# Altium schematic symbol library Module.SchLib: 89 symbols
Pins are listed as number, name and electrical type; pins without a type are passive.

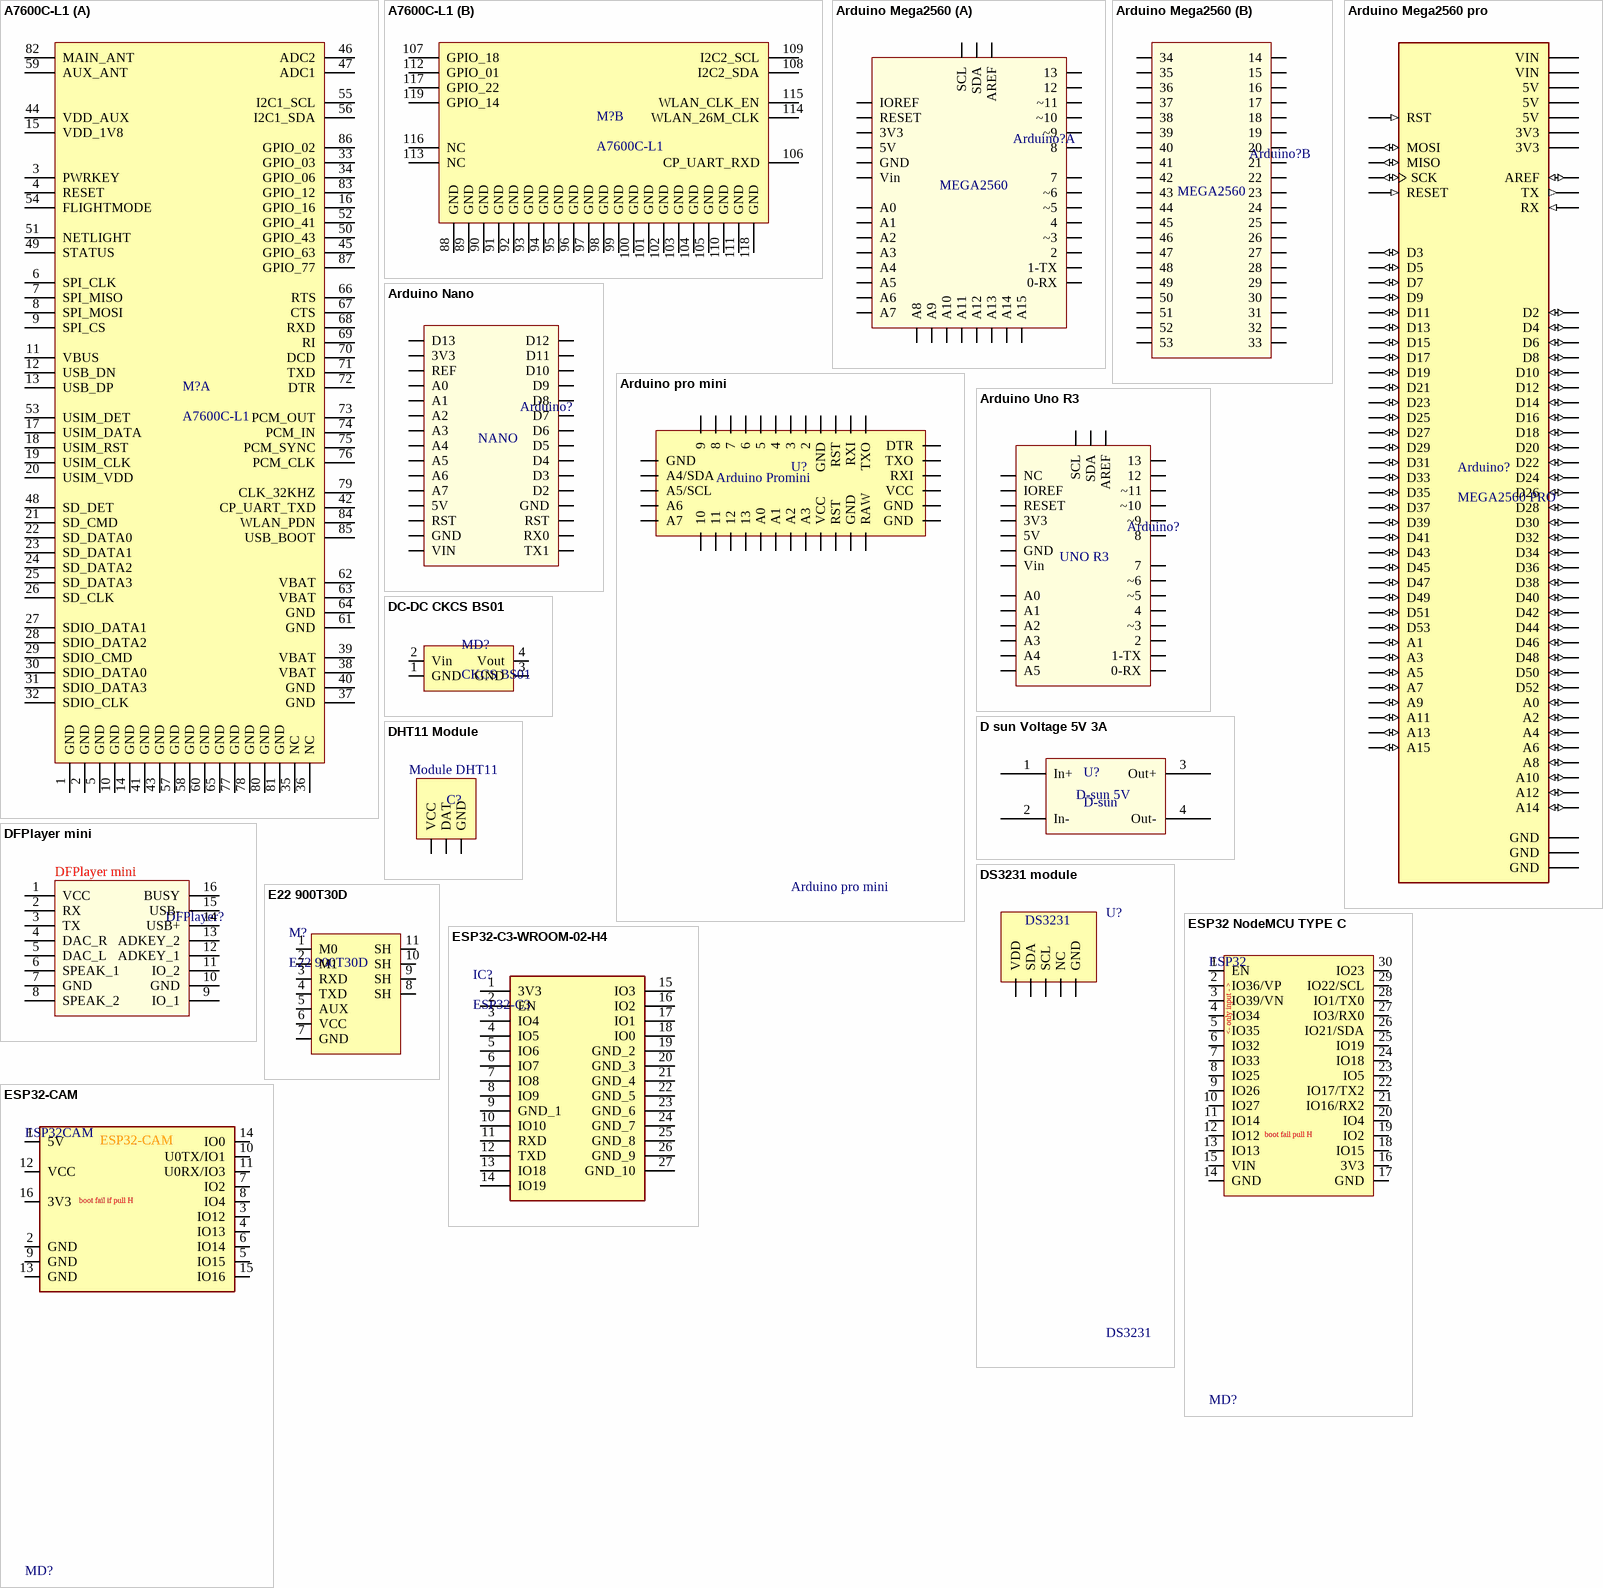
[diagram p0: symbols A7600C-L1 to ESP32-CAM]

## A7600C-L1
designator M?
LTE-FDD: B1/B3/B5/B8 / LTE-TDD: B38/B39/B40/B41 / UMTS/HSDPA/HSPA+:B1/B8 / GSM/GPRS/EDGE:900/1800MHz; Code: 6001-123
footprint A7600C (SIM7600 Series)
part A pins: 1 GND, 2 GND, 3 PWRKEY, 4 RESET, 5 GND, 6 SPI_CLK, 7 SPI_MISO, 8 SPI_MOSI, 9 SPI_CS, 10 GND, 11 VBUS, 12 USB_DN, 13 USB_DP, 14 GND, 15 VDD_1V8, 16 GPIO_16, 17 USIM_DATA, 18 USIM_RST, 19 USIM_CLK, 20 USIM_VDD, 21 SD_CMD, 22 SD_DATA0, 23 SD_DATA1, 24 SD_DATA2, 25 SD_DATA3, 26 SD_CLK, 27 SDIO_DATA1, 28 SDIO_DATA2, 29 SDIO_CMD, 30 SDIO_DATA0, 31 SDIO_DATA3, 32 SDIO_CLK, 33 GPIO_03, 34 GPIO_06, 35 NC, 36 NC, 37 GND, 38 VBAT, 39 VBAT, 40 GND, 41 GND, 42 CP_UART_TXD, 43 GND, 44 VDD_AUX, 45 GPIO_63, 46 ADC2, 47 ADC1, 48 SD_DET, 49 STATUS, 50 GPIO_43, 51 NETLIGHT, 52 GPIO_41, 53 USIM_DET, 54 FLIGHTMODE, 55 I2C1_SCL, 56 I2C1_SDA, 57 GND, 58 GND, 59 AUX_ANT, 60 GND, 61 GND, 62 VBAT, 63 VBAT, 64 GND, 65 GND, 66 RTS, 67 CTS, 68 RXD, 69 RI, 70 DCD, 71 TXD, 72 DTR, 73 PCM_OUT, 74 PCM_IN, 75 PCM_SYNC, 76 PCM_CLK, 77 GND, 78 GND, 79 CLK_32KHZ, 80 GND, 81 GND, 82 MAIN_ANT, 83 GPIO_12, 84 WLAN_PDN, 85 USB_BOOT, 86 GPIO_02, 87 GPIO_77
part B pins: 88 GND, 89 GND, 90 GND, 91 GND, 92 GND, 93 GND, 94 GND, 95 GND, 96 GND, 97 GND, 98 GND, 99 GND, 100 GND, 101 GND, 102 GND, 103 GND, 104 GND, 105 GND, 106 CP_UART_RXD, 107 GPIO_18, 108 I2C2_SDA, 109 I2C2_SCL, 110 GND, 111 GND, 112 GPIO_01, 113 NC, 114 WLAN_26M_CLK, 115 WLAN_CLK_EN, 116 NC, 117 GPIO_22, 118 GND, 119 GPIO_14

## Arduino Mega2560
designator Arduino?
Arduino MEGA2560; Code: 7006-026
footprint Arduino MEGA2560
part A pins: 0-RX, 1-TX, 2, 3V3, 4, 5V, 7, 8, 12, 13, A0, A1, A2, A3, A4, A5, A6, A7, A8, A9, A10, A11, A12, A13, A14, A15, AREF, GND, IOREF, RESET, SCL, SDA, Vin, ~3, ~5, ~6, ~9, ~10, ~11
part B pins: 14, 15, 16, 17, 18, 19, 20, 21, 22, 23, 24, 25, 26, 27, 28, 29, 30, 31, 32, 33, 34, 35, 36, 37, 38, 39, 40, 41, 42, 43, 44, 45, 46, 47, 48, 49, 50, 51, 52, 53
part A text: MEGA2560
part B text: MEGA2560

## Arduino Mega2560 pro
designator Arduino?, comment MEGA2560 PRO
footprint Arduino mega2560 promini
pins: 3V3_1 3V3 (power), 3V3_2 3V3 (power), 5V_1 5V (power), 5V_2 5V (power), 5V_3 5V (power), A0 (io), A1 (io), A2 (io), A3 (io), A4 (io), A5 (io), A6 (io), A7 (io), A8 (io), A9 (io), A10 (io), A11 (io), A12 (io), A13 (io), A14 (io), A15 (io), AREF (io), D2 (io), D3 (io), D4 (io), D5 (io), D6 (io), D7 (io), D8 (io), D9 (io), D10 (io), D11 (io), D12 (io), D13 (io), D14 (io), D15 (io), D16 (io), D17 (io), D18 (io), D19 (io), D20 (io), D21 (io), D22 (io), D23 (io), D24 (io), D25 (io), D26 (io), D27 (io), D28 (io), D29 (io), D30 (io), D31 (io), D32 (io), D33 (io), D34 (io), D35 (io), D36 (io), D37 (io), D38 (io), D39 (io), D40 (io), D41 (io), D42 (io), D43 (io), D44 (io), D45 (io), D46 (io), D47 (io), D48 (io), D49 (io), D50 (io), D51 (io), D52 (io), D53 (io), GND_1 GND (power), GND_2 GND (power), GND_3 GND (power), MISO (io), MOSI (io), RESET (in), RST (in), RX (in), SCK (io), TX (out), VIN_1 VIN (power), VIN_2 VIN (power)

## Arduino Nano
designator Arduino?
Arduino NANO; Code: 7006-029
footprint Arduino Nano
pins: 3V3, 5V, A0, A1, A2, A3, A4, A5, A6, A7, D2, D3, D4, D5, D6, D7, D8, D9, D10, D11, D12, D13, GND, GND, REF, RST, RST, RX0, TX1, VIN
text: NANO

## Arduino pro mini
designator U?
Arduino pro mini 5V 16Mhz; Code: 7006-027; ComponentLink1Description: Manufacturer Link; ComponentLink2Description: Datasheet; ComponentLink3Description: Packaging Specification
footprint Arduino_Promini
footprint Arduino_Promini header
pins: 1 9, 2 8, 3 7, 4 6, 5, 6 4, 7 3, 8 2, 9 GND, 10 RST, 11 RXI, 12 TXO, 13 DTR, 14 TXO, 15 RXI, 16 VCC, 17 GND, 18 GND, 19 RAW, 20 GND, 21 RST, 22 VCC, 23 A3, 24 A2, 25 A1, 26 A0, 27 13, 28 12, 29 11, 30 10, 31 A7, 32 A6, 33 A5/SCL, 34 A4/SDA, 35 GND
text: Arduino Promini

## Arduino Uno R3
designator Arduino?
Arduino UNO R3; Code: 7006-030
footprint Arduino UNO R3
pins: 0-RX, 1-TX, 2, 3V3, 4, 5V, 7, 8, 12, 13, A0, A1, A2, A3, A4, A5, AREF, GND, IOREF, NC, RESET, SCL, SDA, Vin, ~3, ~5, ~6, ~9, ~10, ~11
text: UNO R3

## D sun Voltage 5V 3A
designator U?, comment D-sun
D Sun voltage 5V 3A; Code: 6013-055
footprint Module D-Sun voltage
pins: 1 In+, 2 In-, 3 Out+, 4 Out-
text: D-sun 5V

## DC-DC CKCS BS01
designator MD?, comment CKCS BS01
Vin: 2.5-5V, Vout: 5V, 8V, 9V, 12V; Designed by: Nhox; Code: N/A
footprint DC-DC CKCS BS01 (DC-DC Convert)
pins: 1 GND, 2 Vin, 3 GND, 4 Vout

## DFPlayer mini
designator DFPlayer?
DFPlayer mini; Code: 6015-037
footprint DFPlayer mini
pins: 1 VCC, 2 RX, 3 TX, 4 DAC_R, 5 DAC_L, 6 SPEAK_1, 7 GND, 8 SPEAK_2, 9 IO_1, 10 GND, 11 IO_2, 12 ADKEY_1, 13 ADKEY_2, 14 USB+, 15 USB-, 16 BUSY

## DHT11 Module
designator C?  (value not drawn)
Module DHT11; Designed by: TranLuyen; ComponentLink1 Description: Manufacturer; ComponentLink2 Description: Datasheet; ComponentLink1URL: http://www.we-online.com; ComponentLink2URL: http://katalog.we-online.de/em/datasheet/6130xx143121.pdf
footprint Module DHT11
pins: 1 VCC, 2 DAT, 3 GND

## DS3231 module
designator U?, comment DS3231
Module real time DS3231; Code: 6016-042
footprint DS3231 (DS3231 real time)
pins: 1 VDD, 2 SDA, 3 SCL, 4 NC, 5 GND

## E22 900T30D
designator M?
868/915MHz 30dBm LoRa Wireless Module; Designed by: nhox; Code_sub1: 3504-029 * 0.3; Code: N/A
footprint E22-900T30D
pins: 1 M0, 2 M1, 3 RXD, 4 TXD, 5 AUX, 6 VCC, 7 GND, 8 SH, 9 SH, 10 SH, 11 SH

## ESP32 NodeMCU TYPE C
designator MD?, comment ESP32
Designed by: TranLuyen; Code: N/A
footprint ESP32 NodeMCU
pins: 1 EN, 2 IO36/VP, 3 IO39/VN, 4 IO34, 5 IO35, 6 IO32, 7 IO33, 8 IO25, 9 IO26, 10 IO27, 11 IO14, 12 IO12, 13 IO13, 14 GND, 15 VIN, 16 3V3, 17 GND, 18 IO15, 19 IO2, 20 IO4, 21 IO16/RX2, 22 IO17/TX2, 23 IO5, 24 IO18, 25 IO19, 26 IO21/SDA, 27 IO3/RX0, 28 IO1/TX0, 29 IO22/SCL, 30 IO23
text: <- only input - >; boot fail pull H

## ESP32-C3-WROOM-02-H4
designator IC?, comment ESP32-C3
ESP32-C3 embedded, 32-bit RISC-V single-core processor, up to 160 MHz; Code: N/A; ComponentLink1Description: Datasheet; ComponentLink1URL: https://www.espressif.com/sites/default/files/documentation/esp32-c3-wroom-02_datasheet_en.pdf
footprint ESP32C3WROOM02H4
pins: 1 3V3, 2 EN, 3 IO4, 4 IO5, 5 IO6, 6 IO7, 7 IO8, 8 IO9, 9 GND_1, 10 IO10, 11 RXD, 12 TXD, 13 IO18, 14 IO19, 15 IO3, 16 IO2, 17 IO1, 18 IO0, 19 GND_2, 20 GND_3, 21 GND_4, 22 GND_5, 23 GND_6, 24 GND_7, 25 GND_8, 26 GND_9, 27 GND_10

## ESP32-CAM
designator MD?, comment ESP32CAM
ESP32-CAM AI-Thinker; Designed by: TranLuyen; Code: N/A
footprint ESP32 CAM
pins: 1 5V, 2 GND, 3 IO12, 4 IO13, 5 IO15, 6 IO14, 7 IO2, 8 IO4, 9 GND, 10 U0TX/IO1, 11 U0RX/IO3, 12 VCC "Jump 0R on module select 3V3 or 5V", 13 GND, 14 IO0, 15 IO16, 16 3V3
text: boot fail if pull H

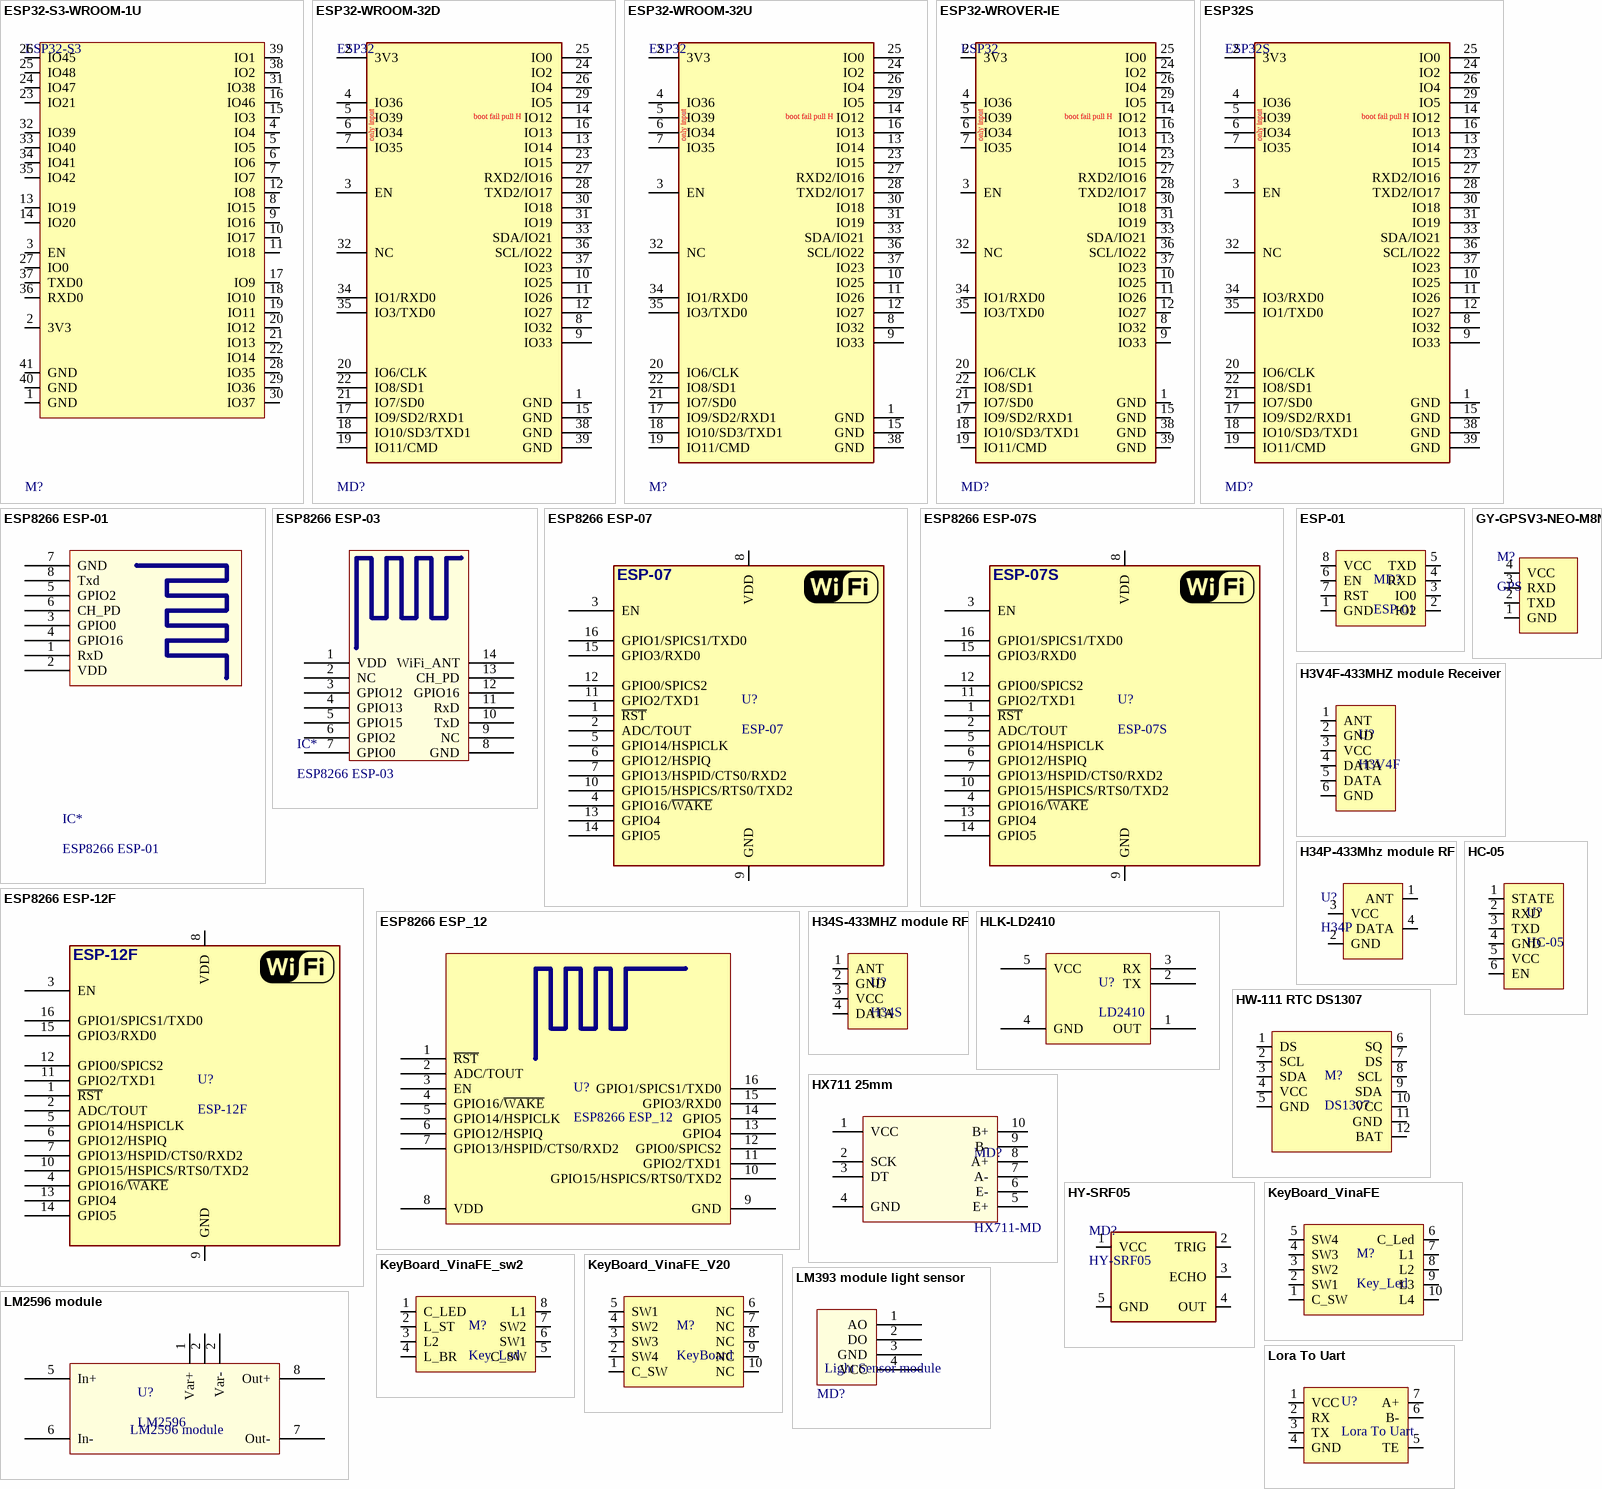
[diagram p1: symbols ESP32-S3-WROOM-1U to Lora To Uart]

## ESP32-S3-WROOM-1U
designator M?, comment ESP32-S3
Designed by: Nhox; Code: N/A
footprint XCVR_ESP32-S3-WROOM-1U
pins: 1 GND, 2 3V3, 3 EN, 4 IO4, 5 IO5, 6 IO6, 7 IO7, 8 IO15, 9 IO16, 10 IO17, 11 IO18, 12 IO8, 13 IO19, 14 IO20, 15 IO3, 16 IO46, 17 IO9, 18 IO10, 19 IO11, 20 IO12, 21 IO13, 22 IO14, 23 IO21, 24 IO47, 25 IO48, 26 IO45, 27 IO0, 28 IO35, 29 IO36, 30 IO37, 31 IO38, 32 IO39, 33 IO40, 34 IO41, 35 IO42, 36 RXD0, 37 TXD0, 38 IO2, 39 IO1, 40 GND, 41 GND

## ESP32-WROOM-32D
designator MD?, comment ESP32
Code: 6003-026; Designed by: TranLuyen
footprint Espressif_Systems_ESP32-WROOM-32D_MFG
pins: 1 GND, 2 3V3, 3 EN, 4 IO36, 5 IO39, 6 IO34, 7 IO35, 8 IO32, 9 IO33, 10 IO25, 11 IO26, 12 IO27, 13 IO14, 14 IO12, 15 GND, 16 IO13, 17 IO9/SD2/RXD1, 18 IO10/SD3/TXD1, 19 IO11/CMD, 20 IO6/CLK, 21 IO7/SD0, 22 IO8/SD1, 23 IO15, 24 IO2, 25 IO0, 26 IO4, 27 RXD2/IO16, 28 TXD2/IO17, 29 IO5, 30 IO18, 31 IO19, 32 NC, 33 SDA/IO21, 34 IO1/RXD0, 35 IO3/TXD0, 36 SCL/IO22, 37 IO23, 38 GND, 39 GND
text: boot fail pull H; only input

## ESP32-WROOM-32U
designator M?, comment ESP32
Code: 6003-081; Designed by: TranLuyen
footprint XCVR_ESP32-WROOM-32U
pins: 1 GND, 2 3V3, 3 EN, 4 IO36, 5 IO39, 6 IO34, 7 IO35, 8 IO32, 9 IO33, 10 IO25, 11 IO26, 12 IO27, 13 IO14, 14 IO12, 15 GND, 16 IO13, 17 IO9/SD2/RXD1, 18 IO10/SD3/TXD1, 19 IO11/CMD, 20 IO6/CLK, 21 IO7/SD0, 22 IO8/SD1, 23 IO15, 24 IO2, 25 IO0, 26 IO4, 27 RXD2/IO16, 28 TXD2/IO17, 29 IO5, 30 IO18, 31 IO19, 32 NC, 33 SDA/IO21, 34 IO1/RXD0, 35 IO3/TXD0, 36 SCL/IO22, 37 IO23, 38 GND
text: boot fail pull H; only input

## ESP32-WROVER-IE
designator MD?, comment ESP32
Designed by: TranLuyen; Code: N/A
footprint XCVR_ESP32-WROVER-I
pins: 1 GND, 2 3V3, 3 EN, 4 IO36, 5 IO39, 6 IO34, 7 IO35, 8 IO32, 9 IO33, 10 IO25, 11 IO26, 12 IO27, 13 IO14, 14 IO12, 15 GND, 16 IO13, 17 IO9/SD2/RXD1, 18 IO10/SD3/TXD1, 19 IO11/CMD, 20 IO6/CLK, 21 IO7/SD0, 22 IO8/SD1, 23 IO15, 24 IO2, 25 IO0, 26 IO4, 27 RXD2/IO16, 28 TXD2/IO17, 29 IO5, 30 IO18, 31 IO19, 32 NC, 33 SDA/IO21, 34 IO1/RXD0, 35 IO3/TXD0, 36 SCL/IO22, 37 IO23, 38 GND, 39 GND
text: boot fail pull H; only input

## ESP32S
designator MD?
Code: 6003-107
footprint ESP32S
pins: 1 GND, 2 3V3, 3 EN, 4 IO36, 5 IO39, 6 IO34, 7 IO35, 8 IO32, 9 IO33, 10 IO25, 11 IO26, 12 IO27, 13 IO14, 14 IO12, 15 GND, 16 IO13, 17 IO9/SD2/RXD1, 18 IO10/SD3/TXD1, 19 IO11/CMD, 20 IO6/CLK, 21 IO7/SD0, 22 IO8/SD1, 23 IO15, 24 IO2, 25 IO0, 26 IO4, 27 RXD2/IO16, 28 TXD2/IO17, 29 IO5, 30 IO18, 31 IO19, 32 NC, 33 SDA/IO21, 34 IO3/RXD0, 35 IO1/TXD0, 36 SCL/IO22, 37 IO23, 38 GND, 39 GND
text: boot fail pull H; only input

## ESP8266 ESP-01
designator IC*
footprint ESP8266 ESP-01
pins: 1 RxD, 2 VDD, 3 GPIO0, 4 GPIO16, 5 GPIO2, 6 CH_PD, 7 GND, 8 Txd

## ESP8266 ESP-03
designator IC*
Code: N/A
footprint ESP8266 ESP-03
pins: 1 VDD, 2 NC, 3 GPIO12, 4 GPIO13, 5 GPIO15, 6 GPIO2, 7 GPIO0, 8 GND, 9 NC, 10 TxD, 11 RxD, 12 GPIO16, 13 CH_PD, 14 WiFi_ANT

## ESP8266 ESP-07
designator U?, comment ESP-07
ESP8266-07-Wifi module; Code: 6003-018; Designed by: TranLuyen
footprint ESP8266 ESP_07 (ESP-07F ESP8266)
pins: 1 ~{RST} "Reset", 2 ADC/TOUT "ADC Input Or TOUT Output", 3 EN "Chip enable", 4 GPIO16/~{WAKE} "GPIO16 or Deep-Sleep Wakeup", 5 GPIO14/HSPICLK "GPIO14 or SPI CLK", 6 GPIO12/HSPIQ "GPIO12 or SPIQ", 7 GPIO13/HSPID/CTS0/RXD2 "GPIO13 or SPID", 8 VDD "Power supply", 9 GND "Power ground", 10 GPIO15/HSPICS/RTS0/TXD2 "GPIO15 or SPICS", 11 GPIO2/TXD1 "GPIO2 or TX", 12 GPIO0/SPICS2 "GPIO0 or SPICS2", 13 GPIO4 "GPIO5", 14 GPIO5 "GPIO4", 15 GPIO3/RXD0 "GPIO3 or UART RXD", 16 GPIO1/SPICS1/TXD0 "GPIO1 or UART TXD"

## ESP8266 ESP-07S
designator U?, comment ESP-07S
ESP8266 Wifi module; Designed by: TranLuyen; Code: N/A
footprint ESP-07S
pins: 1 ~{RST} "Reset", 2 ADC/TOUT "ADC Input Or TOUT Output", 3 EN "Chip enable", 4 GPIO16/~{WAKE} "GPIO16 or Deep-Sleep Wakeup", 5 GPIO14/HSPICLK "GPIO14 or SPI CLK", 6 GPIO12/HSPIQ "GPIO12 or SPIQ", 7 GPIO13/HSPID/CTS0/RXD2 "GPIO13 or SPID", 8 VDD "Power supply", 9 GND "Power ground", 10 GPIO15/HSPICS/RTS0/TXD2 "GPIO15 or SPICS", 11 GPIO2/TXD1 "GPIO2 or TX", 12 GPIO0/SPICS2 "GPIO0 or SPICS2", 13 GPIO4 "GPIO5", 14 GPIO5 "GPIO4", 15 GPIO3/RXD0 "GPIO3 or UART RXD", 16 GPIO1/SPICS1/TXD0 "GPIO1 or UART TXD"

## ESP8266 ESP-12F
designator U?, comment ESP-12F
ESP8266-12F-Wifi module; Code: 6003-032; Designed by: TranLuyen
footprint ESP8266 ESP_12F (ESP-12F ESP8266)
pins: 1 ~{RST} "Reset", 2 ADC/TOUT "ADC Input Or TOUT Output", 3 EN "Chip enable", 4 GPIO16/~{WAKE} "GPIO16 or Deep-Sleep Wakeup", 5 GPIO14/HSPICLK "GPIO14 or SPI CLK", 6 GPIO12/HSPIQ "GPIO12 or SPIQ", 7 GPIO13/HSPID/CTS0/RXD2 "GPIO13 or SPID", 8 VDD "Power supply", 9 GND "Power ground", 10 GPIO15/HSPICS/RTS0/TXD2 "GPIO15 or SPICS", 11 GPIO2/TXD1 "GPIO2 or TX", 12 GPIO0/SPICS2 "GPIO0 or SPICS2", 13 GPIO4 "GPIO5", 14 GPIO5 "GPIO4", 15 GPIO3/RXD0 "GPIO3 or UART RXD", 16 GPIO1/SPICS1/TXD0 "GPIO1 or UART TXD"

## ESP8266 ESP_12
designator U?
ESP8266 ESP-12; IC: ESP8266-EX; Vendor: Ai-thinker; LatestReviewer: Zion Blue; Published: 14-Apr-2015; Publisher: Cynetik Group; LatestRevisionData: 14-Apr-2015; LatestRevisionNote: Include 3D body and Footprint
footprint ESP8266 ESP_12 (ESP8266 ESP-12)
pins: 1 ~{RST} "Reset", 2 ADC/TOUT "ADC Input Or TOUT Output", 3 EN "Chip enable", 4 GPIO16/~{WAKE} "GPIO16 or Deep-Sleep Wakeup", 5 GPIO14/HSPICLK "GPIO14 or SPI CLK", 6 GPIO12/HSPIQ "GPIO12 or SPIQ", 7 GPIO13/HSPID/CTS0/RXD2 "GPIO13 or SPID", 8 VDD "Power supply", 9 GND "Power ground", 10 GPIO15/HSPICS/RTS0/TXD2 "GPIO15 or SPICS", 11 GPIO2/TXD1 "GPIO2 or TX", 12 GPIO0/SPICS2 "GPIO0 or SPICS2", 13 GPIO4 "GPIO5", 14 GPIO5 "GPIO4", 15 GPIO3/RXD0 "GPIO3 or UART RXD", 16 GPIO1/SPICS1/TXD0 "GPIO1 or UART TXD"

## ESP-01
designator MD?
ESP8266-01, ESP-01; Code: 6003-019; Designed by: Nhox
footprint ESP8266 ESP-01_HDR (ESP8266 ESP-01)
pins: 1 GND, 2 IO2, 3 IO0, 4 RXD, 5 TXD, 6 EN, 7 RST, 8 VCC

## GY-GPSV3-NEO-M8N
designator M?, comment GPS
GY-GPSV3-NEO-M8N; Designed by: Nhox; Code_sub1: 3504-029 * 0.1; Code: N/A
footprint GY-GPSV3-NEO
pins: 1 GND, 2 TXD, 3 RXD, 4 VCC

## H3V4F-433MHZ module Receiver
designator U?, comment H3V4F
H3V4F-433MHZ module RF Receiver; Designed by: TranLuyen; Code: M-6001-107
footprint Module RF H3V4F (H3V4F 433M Receiver 18x12x2mm)
pins: 1 ANT, 2 GND, 3 VCC, 4 DATA, 5 DATA, 6 GND

## H34P-433Mhz module RF
designator U?, comment H34P
H34P-433Mhz module RF transmiter; Designed by: Nhox; Code: 6003-086
footprint H34P 433M
pins: 1 ANT, 2 GND, 3 VCC, 4 DATA

## H34S-433MHZ module RF
designator U?, comment H34S
H34S-433MHZ module RF transmiter; Designed by: TranLuyen; Code: 6200-137
footprint H34S 433M
pins: 1 ANT, 2 GND, 3 VCC, 4 DATA

## HC-05
designator U?
Bluetooth; Code: M-6004-021
footprint XH2.54_6P (PW10-xx-M, JST-BxB-XH-A pitch: 2.5mm)
pins: 1 STATE, 2 RXD, 3 TXD, 4 GND, 5 VCC, 6 EN

## HLK-LD2410
designator U?, comment LD2410
Radar_human; Code: M-500-009-3
footprint HLK-LD2410
pins: 1 OUT, 2 TX, 3 RX, 4 GND, 5 VCC

## HW-111 RTC DS1307
designator M?, comment DS1307
Code: 6016-029
footprint DS1307 HW-111
pins: 1 DS, 2 SCL, 3 SDA, 4 VCC, 5 GND, 6 SQ, 7 DS, 8 SCL, 9 SDA, 10 VCC, 11 GND, 12 BAT

## HX711 25mm
designator MD?, comment HX711-MD
HX711 module; Code: 6018-003
footprint HX711-25mm (HX711-Module-25mm)
pins: 1 VCC, 2 SCK, 3 DT, 4 GND, 5 E+, 6 E-, 7 A-, 8 A+, 9 B-, 10 B+

## HY-SRF05
designator MD?
HY-SRF05 Precision Ultrasonic Sensor; Code: N/A
footprint Module HY-SRF05 (Ultrasonic sensor Module)
pins: 1 VCC, 2 TRIG, 3 ECHO, 4 OUT, 5 GND

## KeyBoard_VinaFE
designator M?, comment Key_Led
Code_sub1: 3504-029 x0.5; Code: N/A
footprint KeyBoard_VinaFE
pins: 1 C_SW, 2 SW1, 3 SW2, 4 SW3, 5 SW4, 6 C_Led, 7 L1, 8 L2, 9 L3, 10 L4

## KeyBoard_VinaFE_sw2
designator M?, comment Key_Led
Code_sub1: 3504-038 x 0.2; Code: N/A
footprint Keyboard sw2
pins: 1 C_LED, 2 L_ST, 3 L2, 4 L_BR, 5 C_SW, 6 SW1, 7 SW2, 8 L1

## KeyBoard_VinaFE_V20
designator M?, comment KeyBoard
KeyBoard VinaFE V20; Designed by: Nhox; Code: N/A
footprint KeyBoard_VinaFE_V20
pins: 1 C_SW, 2 SW4, 3 SW3, 4 SW2, 5 SW1, 6 NC, 7 NC, 8 NC, 9 NC, 10 NC

## LM393 module light sensor
designator MD?, comment Light Sensor module
footprint LM393 module light sensor
pins: 1 AO, 2 DO, 3 GND, 4 VCC

## LM2596 module
designator U?, comment LM2596
Code: 6013-064
footprint Module LM2596
pins: 1 Var+, 2 Var-, 2 Var-, 5 In+, 6 In-, 7 Out-, 8 Out+

## Lora To Uart
designator U?
Lora To Uart use PIC 16F76 and SX1278; Code: N/A
footprint Lora To Uart
pins: 1 VCC, 2 RX, 3 TX, 4 GND, 5 TE, 6 B-, 7 A+

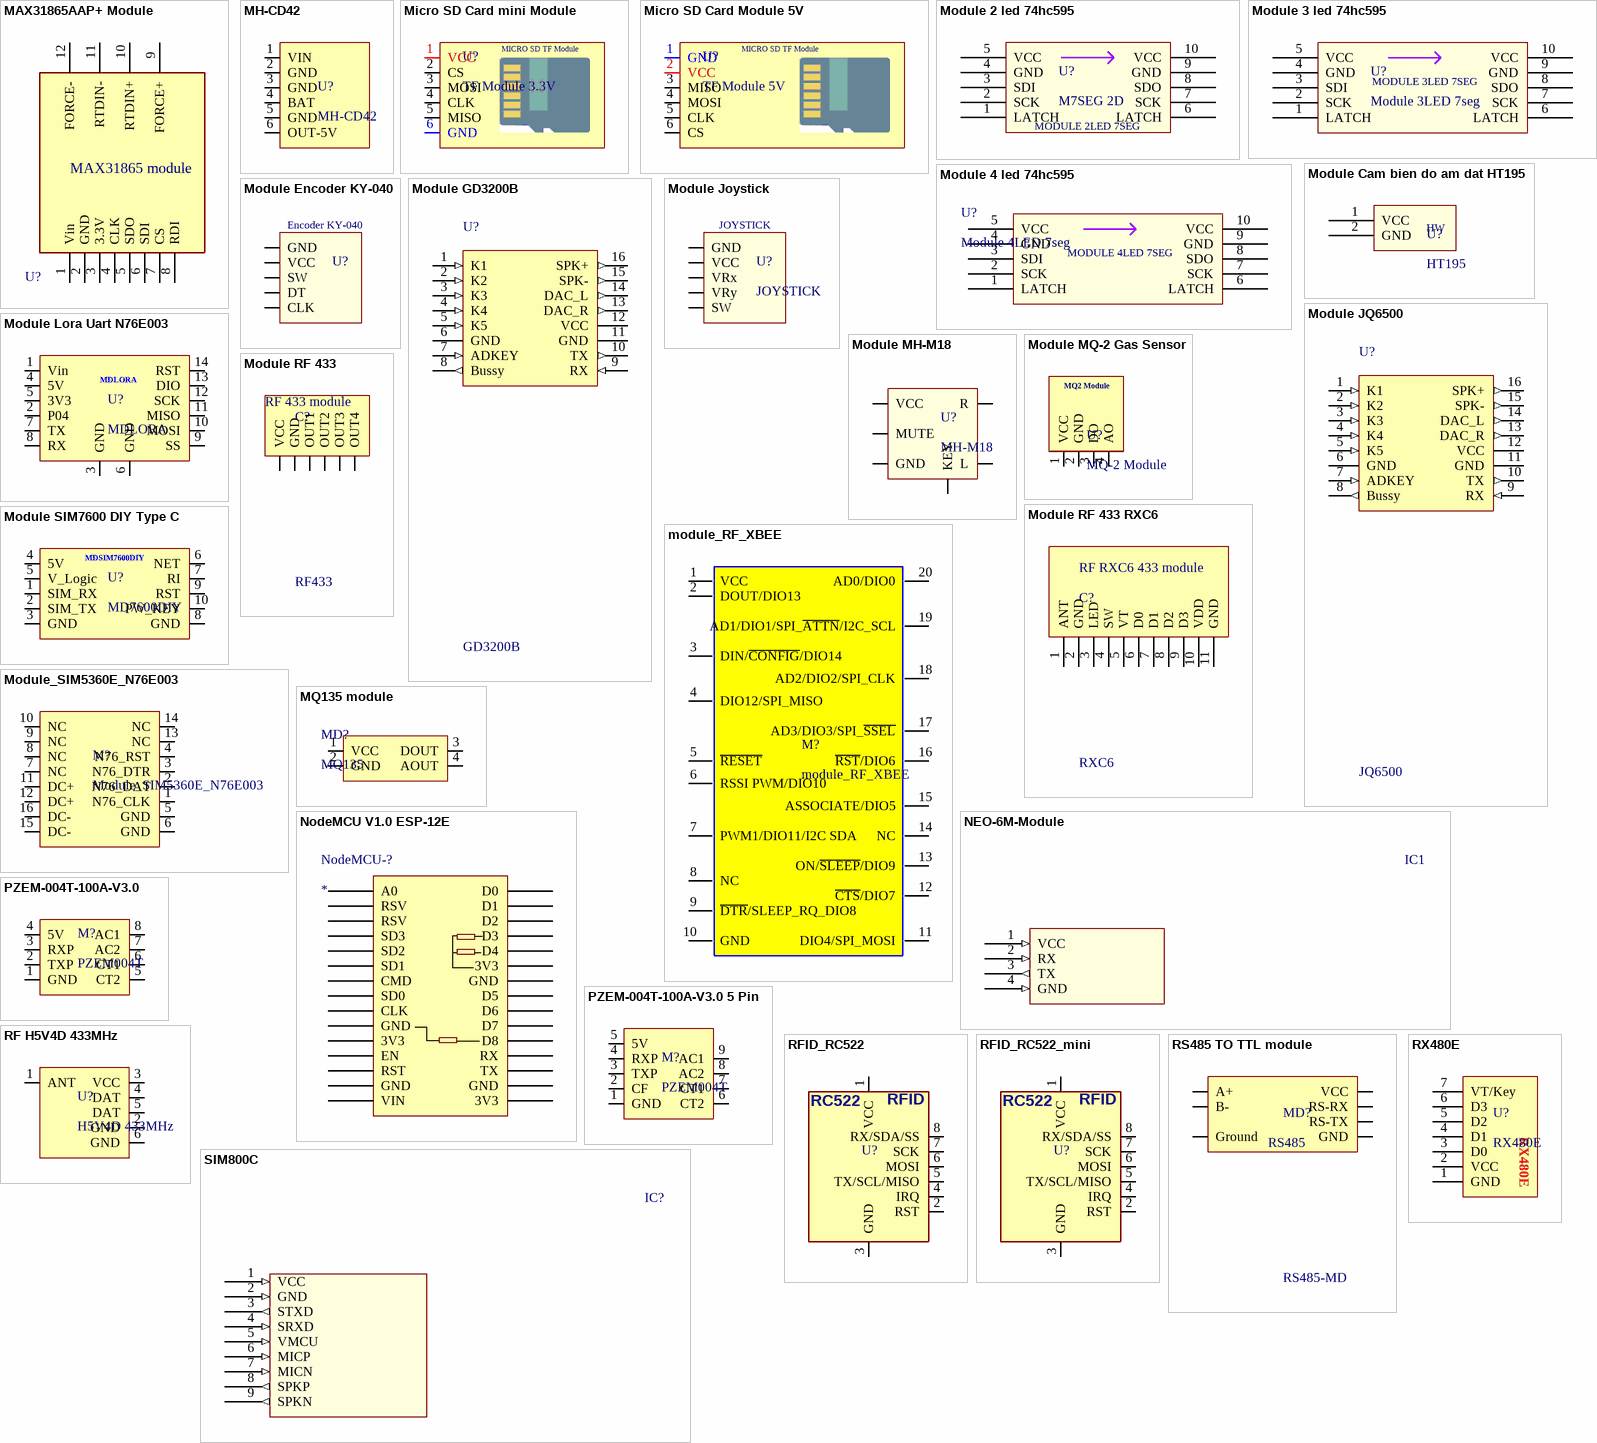
[diagram p2: symbols MAX31865AAP+ Module to SIM800C]

## MAX31865AAP+ Module
designator U?, comment MAX31865  (value not drawn)
Module MAX 31865 RTD PT100 PT1000; Designed by: TranLuyen; Code: N/A
footprint module max31865
pins: 1 Vin, 2 GND, 3 3.3V, 4 CLK, 5 SDO, 6 SDI, 7 CS, 8 RDI, 9 FORCE+, 10 RTDIN+, 11 RTDIN-, 12 FORCE-
text: MAX31865 module

## MH-CD42
designator U?
Code: 6200-063
footprint MH-CD42
pins: 1 VIN, 2 GND, 3 GND, 4 BAT, 5 GND, 6 OUT-5V

## Micro SD Card mini Module
designator U?, comment TF Module 3.3V
3.3V
footprint MICRO SD CARD MODULE 3V
pins: 1 VCC, 2 CS, 3 MOSI, 4 CLK, 5 MISO, 6 GND
text: MICRO SD TF Module

## Micro SD Card Module 5V
designator U?, comment TF Module 5V
footprint Micro SD Card Module 5V (5V)
pins: 1 GND, 2 VCC, 3 MISO, 4 MOSI, 5 CLK, 6 CS
text: MICRO SD TF Module

## Module 2 led 74hc595
designator U?, comment M7SEG 2D
Module 2 led 7SEG 74hc595 0.56"; Code: 6016-050
footprint Module 2 Led 74hc595
pins: 1 LATCH, 2 SCK, 3 SDI, 4 GND, 5 VCC, 6 LATCH, 7 SCK, 8 SDO, 9 GND, 10 VCC
text: MODULE 2LED 7SEG

## Module 3 led 74hc595
designator U?, comment Module 3LED 7seg
Code: 6016-050-2
footprint Module 3 Led 74hc595
pins: 1 LATCH, 2 SCK, 3 SDI, 4 GND, 5 VCC, 6 LATCH, 7 SCK, 8 SDO, 9 GND, 10 VCC
text: MODULE 3LED 7SEG

## Module 4 led 74hc595
designator U?, comment Module 4LED 7seg
Code: 6016-050-3
footprint Module 4 Led 74hc595
pins: 1 LATCH, 2 SCK, 3 SDI, 4 GND, 5 VCC, 6 LATCH, 7 SCK, 8 SDO, 9 GND, 10 VCC
text: MODULE 4LED 7SEG

## Module Cam bien do am dat HT195
designator U?, comment HT195
Module cam bien do am dat MH - HT195; Code: M-6102-016
footprint Module MH HT195 Cam bien do am dat
pins: 1 VCC, 2 GND
text: HW

## Module Encoder KY-040
designator U?, comment KY-040  (value not drawn)
Module Encoder Rotary KY-040; Designed by: TranLuyen
footprint Module Encoder Rotary KY 040
pins: 1 GND, 2 VCC, 3 SW, 4 DT, 5 CLK
text: Encoder KY-040

## Module GD3200B
designator U?, comment GD3200B
Code: 6015-040
footprint JQ6500 md (16 P)
pins: 1 K1 (in), 2 K2 (in), 3 K3 (in), 4 K4 (in), 5 K5 (in), 6 GND (power), 7 ADKEY (in), 8 Bussy (out), 9 RX (in), 10 TX (out), 11 GND (power), 12 VCC (power), 13 DAC_R (out), 14 DAC_L (out), 15 SPK- (out), 16 SPK+ (out)

## Module Joystick
designator U?, comment JOYSTICK
Module Joystick; Designed by: TranLuyen
footprint Module JOYSTICK
pins: 1 GND, 2 VCC, 3 VRx, 4 VRy, 5 SW

## Module JQ6500
designator U?, comment JQ6500
Code: 7006-050
footprint JQ6500 md (16 P)
pins: 1 K1 (in), 2 K2 (in), 3 K3 (in), 4 K4 (in), 5 K5 (in), 6 GND (power), 7 ADKEY (in), 8 Bussy (out), 9 RX (in), 10 TX (out), 11 GND (power), 12 VCC (power), 13 DAC_R (out), 14 DAC_L (out), 15 SPK- (out), 16 SPK+ (out)

## Module Lora Uart N76E003
designator U?, comment MDLORA
Module Lora Uart N76E003; Code: N/A
footprint MODULE LORA N76E003
pins: 1 Vin, 2 P04, 3 GND, 4 5V, 5 3V3, 6 GND, 7 TX, 8 RX, 9 SS, 10 MOSI, 11 MISO, 12 SCK, 13 DIO, 14 RST

## Module MH-M18
designator U?, comment MH-M18
MH-M18 module bluetooth
footprint MH-M18
pins: 1 R, 2 L, 3 GND, 4 VCC, 5 MUTE, 6 KEY

## Module MQ-2 Gas Sensor
designator U?, comment MQ-2 Module
Code: M-6105-011; Designed by: TranLuyen
footprint Module MQ-2 Gas Sensor
pins: 1 VCC, 2 GND, 3 DO, 4 AO
text: MQ2 Module

## Module RF 433
designator C?, comment RF433
Module RF 433; Code: 6001-088; ComponentLink1 Description: Manufacturer; ComponentLink2 Description: Datasheet; ComponentLink1URL: http://www.we-online.com; ComponentLink2URL: http://katalog.we-online.de/em/datasheet/6130xx143121.pdf
footprint RF 433 module (Connector; Header; 6 Position; Right Angle)
footprint RF 433 module nam (Connector; Header; 6 Position; Right Angle)
pins: 1 VCC, 2 GND, 3 OUT1, 4 OUT2, 5 OUT3, 6 OUT4
text: RF 433 module

## Module RF 433 RXC6
designator C?, comment RXC6
Module RF 433 Receiver; Code: 6001-088; ComponentLink1 Description: Manufacturer; ComponentLink2 Description: Datasheet; ComponentLink1URL: http://www.we-online.com; ComponentLink2URL: http://katalog.we-online.de/em/datasheet/6130xx143121.pdf
footprint Module RF RXC6 Dung (RXC6 433M Receiver)
footprint Module RF RXC6 Nam (RXC6 433M Receiver)
pins: 1 ANT, 2 GND, 3 LED, 4 SW, 5 VT, 6 D0, 7 D1, 8 D2, 9 D3, 10 VDD, 11 GND
text: RF RXC6 433 module

## Module SIM7600 DIY Type C
designator U?, comment MD7600DIY
Module SIM 7600; Code: N/A
footprint MODULE_SIM7600_DIY_TYPE-C
pins: 1 SIM_RX, 2 SIM_TX, 3 GND, 4 5V, 5 V_Logic, 6 NET, 7 RI, 8 GND, 9 RST, 10 PW_KEY
text: MDSIM7600DIY

## module_RF_XBEE
designator M?
footprint XBEE_RF MODULE
pins: 1 VCC, 2 DOUT/DIO13, 3 DIN/~{CONFIG}/DIO14, 4 DIO12/SPI_MISO, 5 ~{RESET}, 6 RSSI PWM/DIO10, 7 PWM1/DIO11/I2C SDA, 8 NC, 9 ~{DTR}/SLEEP_RQ_DIO8, 10 GND, 11 DIO4/SPI_MOSI, 12 ~{CTS}/DIO7, 13 ON/~{SLEEP}/DIO9, 14 NC, 15 ASSOCIATE/DIO5, 16 ~{RST}/DIO6, 17 AD3/DIO3/SPI_~{SSEL}, 18 AD2/DIO2/SPI_CLK, 19 AD1/DIO1/SPI_~{ATTN}/I2C_SCL, 20 AD0/DIO0

## Module_SIM5360E_N76E003
designator M?
Code: N/A
footprint Module_SIM5360E_N76E003
pins: 1 N76_CLK, 2 N76_DAT, 3 N76_DTR, 4 N76_RST, 5 GND, 6 GND, 7 NC, 8 NC, 9 NC, 10 NC, 11 DC+, 12 DC+, 13 NC, 14 NC, 15 DC-, 16 DC-

## MQ135 module
designator MD?, comment MQ135
Code: N/A
footprint MQ135 Module
pins: 1 VCC, 2 GND, 3 DOUT, 4 AOUT

## NEO-6M-Module
designator IC1, comment NEO 6M  (value not drawn)
Module GPS NEO 6M; Designed by: TranLuyen; ComponentLink1Description: http://www.tme.vn/upload/pdf/SIM900A_HD_V1.01.pdf; ComponentLink1URL: http://www.tme.vn/upload/pdf/SIM900A_HD_V1.01.pdf; Code: N/A
footprint Module GPS NEO 6M
pins: 1 VCC (in), 2 RX (in), 3 TX (out), 4 GND (in)

## NodeMCU V1.0 ESP-12E
designator NodeMCU-?
NodeMCU V1.0 ESP8266 (ESP-12E); Code: 6003-011
footprint NodeMCU V1.0 ESP-12E .
pins: 3V3, 3V3, 3V3, A0, CLK, CMD, D0, D1, D2, D3, D4, D5, D6, D7, D8, EN, GND, GND, GND, GND, RST, RSV, RSV, RX, SD0, SD1, SD2, SD3, TX, VIN

## PZEM-004T-100A-V3.0
designator M?, comment PZEM004T
PZEM-004T-100A-V3.0; Code: N/A
footprint PZEM-004T-100A-V3.0
pins: 1 GND, 2 TXP, 3 RXP, 4 5V, 5 CT2, 6 CT1, 7 AC2, 8 AC1

## PZEM-004T-100A-V3.0 5 Pin
designator M?, comment PZEM004T
PZEM-004T-100A-V3.0 5 Pin; Code: N/A
footprint PZEM-004T-100A-V3.0-5Pin
pins: 1 GND, 2 CF, 3 TXP, 4 RXP, 5 5V, 6 CT2, 7 CT1, 8 AC2, 9 AC1

## RF H5V4D 433MHz
designator U?, comment H5V4D 433MHz
Code: M-6001-106
footprint RF_H5V4D_433Mhz
footprint RF_H5V4D_433Mhz Dung
pins: 1 ANT, 2 GND, 3 VCC, 4 DAT, 5 DAT, 6 GND

## RFID_RC522
designator U?, comment MD-RC522  (value not drawn)
RFID MODULE with MFRC522; Code: 6002-026; Designed by: TranLuyen
footprint RFID_RC522 (RFID module header RC522)
footprint RFID_RC522 - HDR (RFID module header RC522)
pins: 1 VCC, 2 RST, 3 GND, 4 IRQ, 5 TX/SCL/MISO, 6 MOSI, 7 SCK, 8 RX/SDA/SS
text: RFID; RC522

## RFID_RC522_mini
designator U?, comment MD-RC522_mini  (value not drawn)
RFID MODULE with MFRC522 mini; Code: N/A
footprint RFID_RC522 - mini (RFID module header RC522 mini)
pins: 1 VCC, 2 RST, 3 GND, 4 IRQ, 5 TX/SCL/MISO, 6 MOSI, 7 SCK, 8 RX/SDA/SS
text: RFID; RC522

## RS485 TO TTL module
designator MD?, comment RS485-MD
Module RF485 TO TTL; Code: 6010-053; ComponentLink1 Description: Manufacturer; ComponentLink2 Description: Datasheet; ComponentLink1URL: http://www.we-online.com; ComponentLink2URL: http://katalog.we-online.de/em/datasheet/6130xx143121.pdf
footprint RS485 DIP
footprint RS485 SMD
footprint RS485 DIP_SMD
pins: 1 Ground, 2 B-, 3 A+, 4 VCC, 5 RS-RX, 6 RS-TX, 7 GND
text: RS485

## RX480E
designator U?
RF Module 433Mhz, Learning; Code: M-6001-088-2
footprint RX480E
pins: 1 GND, 2 VCC, 3 D0, 4 D1, 5 D2, 6 D3, 7 VT/Key

## SIM800C
designator IC?  (value not drawn)
SIM800C Module; Code: 6006-003; Designed by: TranLuyen; ComponentLink1Description: http://www.tme.vn/upload/pdf/SIM900A_HD_V1.01.pdf; ComponentLink1URL: http://www.tme.vn/upload/pdf/SIM900A_HD_V1.01.pdf
footprint SIM800C Module
pins: 1 VCC (in), 2 GND (in), 3 STXD (out), 4 SRXD (in), 5 VMCU (in), 6 MICP (in), 7 MICN (in), 8 SPKP (out), 9 SPKN (out)

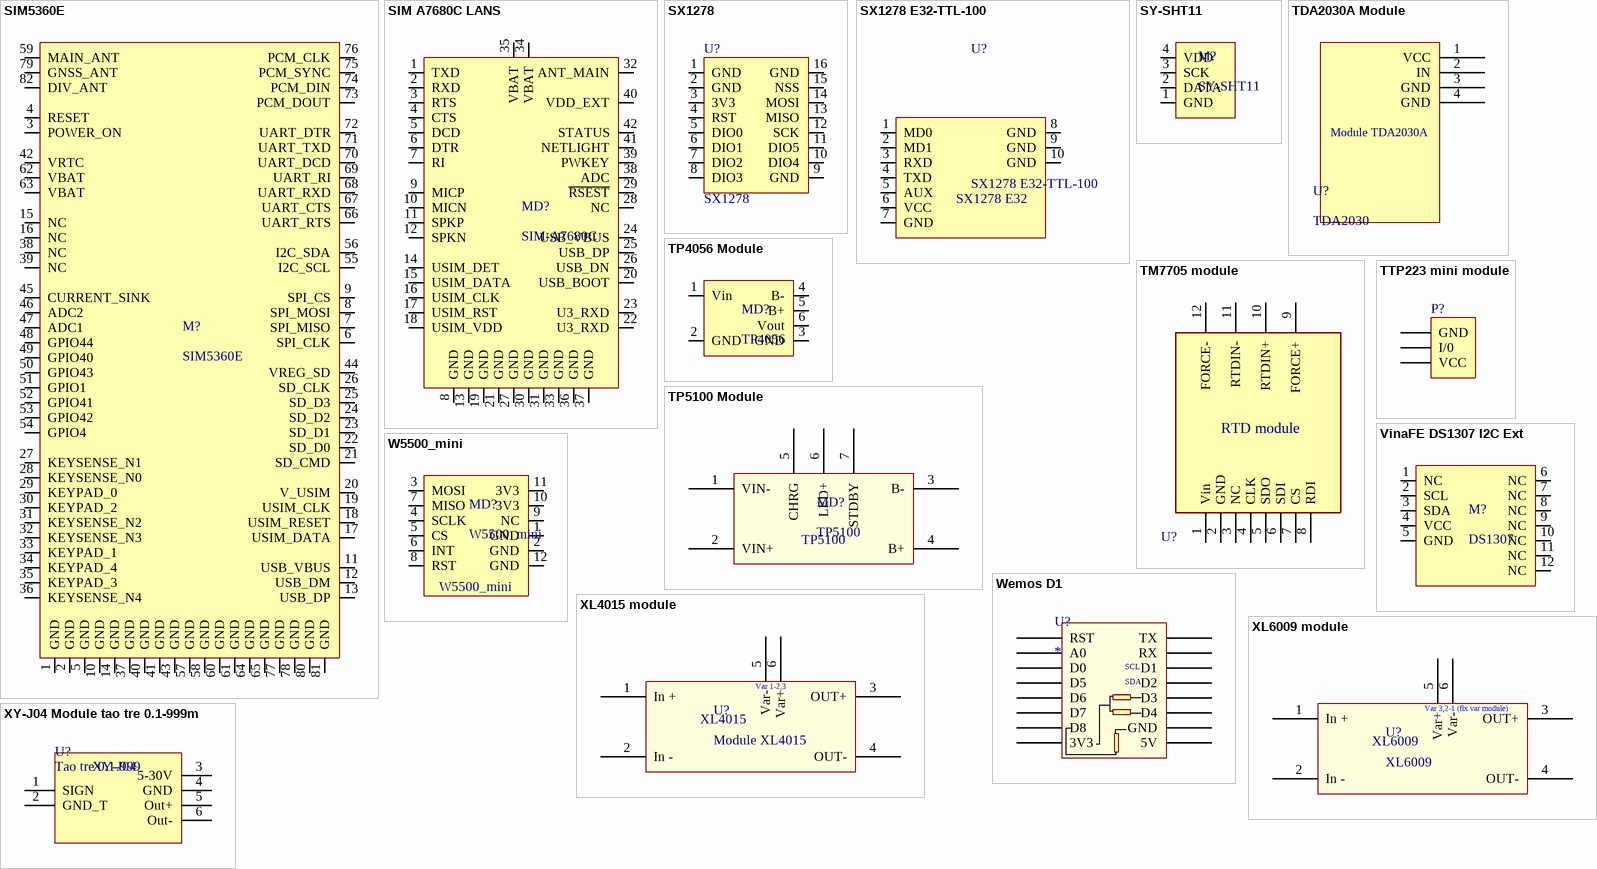
[diagram p3: symbols SIM5360E to XY-J04 Module tao tre 0.1-999m]

## SIM5360E
designator M?
Code: N/A
footprint SIM5360E
pins: 1 GND, 2 GND, 3 POWER_ON, 4 RESET, 5 GND, 6 SPI_CLK, 7 SPI_MISO, 8 SPI_MOSI, 9 SPI_CS, 10 GND, 11 USB_VBUS, 12 USB_DM, 13 USB_DP, 14 GND, 15 NC, 16 NC, 17 USIM_DATA, 18 USIM_RESET, 19 USIM_CLK, 20 V_USIM, 21 SD_CMD, 22 SD_D0, 23 SD_D1, 24 SD_D2, 25 SD_D3, 26 SD_CLK, 27 KEYSENSE_N1, 28 KEYSENSE_N0, 29 KEYPAD_0, 30 KEYPAD_2, 31 KEYSENSE_N2, 32 KEYSENSE_N3, 33 KEYPAD_1, 34 KEYPAD_4, 35 KEYPAD_3, 36 KEYSENSE_N4, 37 GND, 38 NC, 39 NC, 40 GND, 41 GND, 42 VRTC, 43 GND, 44 VREG_SD, 45 CURRENT_SINK, 46 ADC2, 47 ADC1, 48 GPIO44, 49 GPIO40, 50 GPIO43, 51 GPIO1, 52 GPIO41, 53 GPIO42, 54 GPIO4, 55 I2C_SCL, 56 I2C_SDA, 57 GND, 58 GND, 59 MAIN_ANT, 60 GND, 61 GND, 62 VBAT, 63 VBAT, 64 GND, 65 GND, 66 UART_RTS, 67 UART_CTS, 68 UART_RXD, 69 UART_RI, 70 UART_DCD, 71 UART_TXD, 72 UART_DTR, 73 PCM_DOUT, 74 PCM_DIN, 75 PCM_SYNC, 76 PCM_CLK, 77 GND, 78 GND, 79 GNSS_ANT, 80 GND, 81 GND, 82 DIV_ANT

## SIM A7680C LANS
designator MD?, comment SIM-A7680C
Designed by: TranLuyen; Code: N/A
footprint SIMA7680C
pins: 1 TXD, 2 RXD, 3 RTS, 4 CTS, 5 DCD, 6 DTR, 7 RI, 8 GND, 9 MICP, 10 MICN, 11 SPKP, 12 SPKN, 13 GND, 14 USIM_DET, 15 USIM_DATA, 16 USIM_CLK, 17 USIM_RST, 18 USIM_VDD, 19 GND, 20 USB_BOOT, 21 GND, 22 U3_RXD, 23 U3_RXD, 24 USB_VBUS, 25 USB_DP, 26 USB_DN, 27 GND, 28 NC, 29 ~{RSEST}, 30 GND, 31 GND, 32 ANT_MAIN, 33 GND, 34 VBAT, 35 VBAT, 36 GND, 37 GND, 38 ADC, 39 PWKEY, 40 VDD_EXT, 41 NETLIGHT, 42 STATUS

## SX1278
designator U?
Lora; Code: 6001-021
footprint Ra-02
footprint Ra-02-antenna
pins: 1 GND (power), 2 GND (power), 3 3V3 (power), 4 RST, 5 DIO0, 6 DIO1, 7 DIO2, 8 DIO3, 9 GND (power), 10 DIO4, 11 DIO5, 12 SCK, 13 MISO, 14 MOSI, 15 NSS, 16 GND (power)

## SX1278 E32-TTL-100
designator U?
Code: 6001-019
footprint SX1278 E32
pins: 1 MD0, 2 MD1, 3 RXD, 4 TXD, 5 AUX, 6 VCC (power), 7 GND (power), 8 GND (power), 9 GND (power), 10 GND (power)
text: SX1278 E32

## SY-SHT11
designator M?
Code: N/A
footprint SHT11
pins: 1 GND, 2 DATA, 3 SCK, 4 VDD

## TDA2030A Module
designator U?, comment TDA2030
Code: 6015-021
footprint TDA2003A_Module (TDA2003A module)
pins: 1 VCC, 2 IN, 3 GND, 4 GND
text: Module TDA2030A

## TM7705 module
designator U?, comment 7705  (value not drawn)
Module RTD; Code: KHM220620; Designed by: TranLuyen
footprint module tm7705
pins: 1 Vin, 2 GND, 3 NC, 4 CLK, 5 SDO, 6 SDI, 7 CS, 8 RDI, 9 FORCE+, 10 RTDIN+, 11 RTDIN-, 12 FORCE-
text: RTD module

## TP4056 Module
designator MD?, comment TP4056
TP4056 Lion, Lipo, Type C 1A; Designed by: Nhox; Code: N/A
footprint TP4056 Type C
pins: 1 Vin, 2 GND, 3 GND, 4 B-, 5 B+, 6 Vout

## TP5100 Module
designator MD?, comment TP5100
Mach sac Pin lithium 2A TP5100
footprint TP5100 (MODULE)
pins: 1 VIN-, 2 VIN+, 3 B-, 4 B+, 5 CHRG, 6 LED+, 7 STDBY

## TTP223 mini module
designator P?
TTP223 mini; Code: 6014-003
footprint TTP223 (Connector; Header; 3 Position)
footprint TTP223 - H (Connector; Header; 3 Position)
pins: 1 GND, 2 I/0, 3 VCC

## VinaFE DS1307 I2C Ext
designator M?, comment DS1307
VinaFE DS1307 I2C Ext; Code_sub1: 3504-029 * 0.3; Designed by: Nhox; Code: N/A
footprint DS1307 DIY I2C EXT
pins: 1 NC, 2 SCL, 3 SDA, 4 VCC, 5 GND, 6 NC, 7 NC, 8 NC, 9 NC, 10 NC, 11 NC, 12 NC

## W5500_mini
designator MD?
Support TCP, UDP, ICMP, IPv4, ARP, IGMP, PPPoE protocol; Code: N/A
footprint W5500_mini
pins: 1 GND, 2 GND, 3 MOSI, 4 SCLK, 5 CS, 6 INT, 7 MISO, 8 RST, 9 NC, 10 3V3, 11 3V3, 12 GND

## Wemos D1
designator U?
Node MCU D1 Mini
footprint Wemos D1 mini
footprint Wemos D1 mini HEADER
pins: 3V3, 5V, A0, D0, D1, D2, D3, D4, D5, D6, D7, D8, GND, RST, RX, TX
text: SCL; SDA

## XL4015 module
designator U?, comment Module XL4015
footprint XL4015
pins: 1 In +, 2 In -, 3 OUT+, 4 OUT-, 5 Var-, 6 Var+
text: Var 1-2,3; XL4015

## XL6009 module
designator U?, comment XL6009
footprint XL6009 (MODULE)
pins: 1 In +, 2 In -, 3 OUT+, 4 OUT-, 5 Var+, 6 Var-
text: Var 3,2-1 (fix var module)

## XY-J04 Module tao tre 0.1-999m
designator U?, comment Tao tre 0.1-999
Code: 6016-033; ComponentLink1Description: Manufacturer Link; ComponentLink2Description: Datasheet
footprint Module tao tre 0.1-999m XY-J04
pins: 1 SIGN (power), 2 GND_T (power), 3 5-30V (power), 4 GND (power), 5 Out+ (power), 6 Out- (power)
text: XY-J04